# Altium schematic symbol library BYTE_SPIne.SchLib: 2 symbols
Pins are listed as number, name and electrical type; pins without a type are passive.

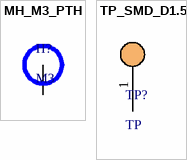
[diagram p0: symbols MH_M3_PTH to TP_SMD_D1.5]

## MH_M3_PTH
designator H?, comment M3  (no BOM)
footprint MH_M3_PTH_GND
footprint MH_M3_PTH
pins: 1

## TP_SMD_D1.5
designator TP?, comment TP  (no BOM)
footprint TP_SMD_D1.5
pins: 1